# Altium schematic symbol library 0454005PMR.SchLib: 1 symbol
Pins are listed as number, name and electrical type; pins without a type are passive.

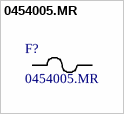
[diagram p0: symbol 0454005.MR]

## 0454005.MR
designator F?
No Description Available; Manufacturer_Name: Littelfuse Inc; Copyright: Copyright (C) 2026 Ultra Librarian. All rights reserved.; Manufacturer_Part_Number: 0454005.MR
footprint 0454Series_LTF
pins: 1, 2